# Altium footprint library MyPCBLib.PcbLib: 103 footprints (part 7 of 7)
Each footprint in its own frame and in the unit in brackets; x right, y up, seen from the top. Pads: shape width x height; smd on the part's side, far side on the other; paste and mask are expansions set on the pad; w line width, h text height; cw(c..) or ccw(c..) is an arc to the next point about the centre after c.
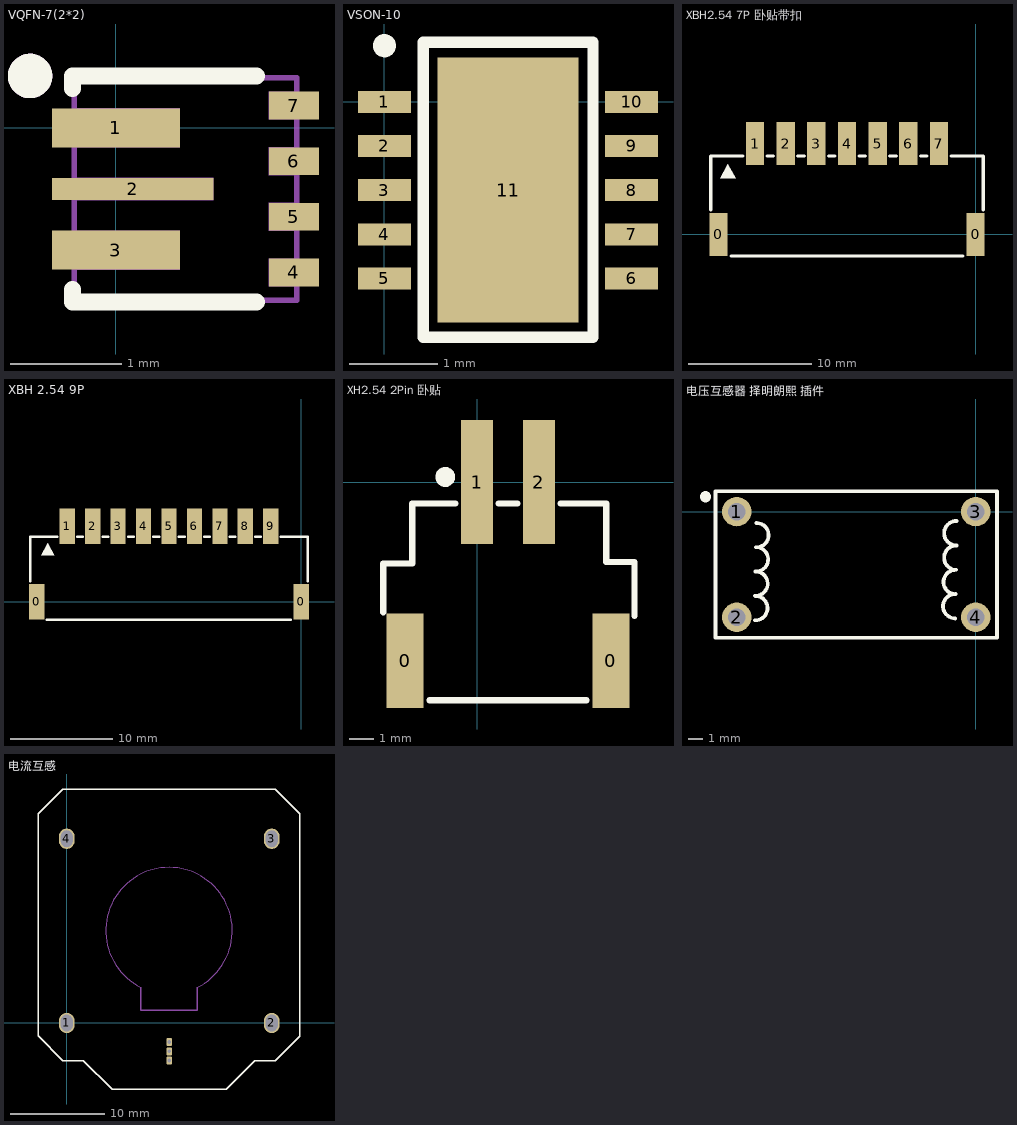
[diagram p6: the footprints below, top view; thin cyan lines are the x and y axes]

## VQFN-7(2*2) [mm]
pads (7):
  rect 1.15x0.35 smd paste+0 mask+0.05: 1(0,0) 3(0,-1.1)
  rect 1.45x0.2 smd paste+0 mask+0.05: 2(0.15,-0.55)
  rect 0.45x0.25 smd paste+0 mask+0.05: 4(1.6,-1.3) 5(1.6,-0.8) 6(1.6,-0.3) 7(1.6,0.2)
Top Overlay:
  circle w0.2: c-0.772,0.466 r0.1
  lines w0.152: -0.391,-1.455 -0.391,-1.566 1.265,-1.566 ; -0.391,0.355 -0.391,0.466 1.265,0.466
Mechanical 6:
  circle w0.2: c-0.772,0.466 r0.1
Mechanical 15:
  region: -0.315,0.45 -0.315,0.475 -0.35,0.51 -0.4,0.51 -0.435,0.475 -0.435,0.45 -0.435,0.425 -0.4,0.39 -0.35,0.39 -0.315,0.425
  region: -0.375,-0.45 0.875,-0.45 0.875,-0.65 -0.375,-0.65
  region: -0.375,-0.925 0.575,-0.925 0.575,-1.275 -0.375,-1.275
  region: -0.375,0.175 0.575,0.175 0.575,-0.175 -0.375,-0.175
  region: 1.375,-1.175 1.625,-1.175 1.625,-1.425 1.375,-1.425
  region: 1.375,-0.675 1.625,-0.675 1.625,-0.925 1.375,-0.925
  region: 1.375,-0.175 1.625,-0.175 1.625,-0.425 1.375,-0.425
  region: 1.375,0.325 1.625,0.325 1.625,0.075 1.375,0.075
  lines w0.051: -0.375,-1.55 1.625,-1.55 1.625,0.45 -0.375,0.45 -0.375,-1.55

## VSON-10 [mil] "TI Power IC"
pads (11):
  rect 23.6x9.8 smd mask+2: 1(0,0) 2(0,-19.7) 3(0,-39.4) 4(0,-59.1) 5(0,-78.8) 6(110.2,-78.8) 7(110.2,-59.1) 8(110.2,-39.4) 9(110.2,-19.7) 10(110.2,0)
  rect 63x118.1 smd mask+2: 11(55.1,-39.4)
Top Overlay:
  circle w5.9: c0,25 r2.2
  lines w5.04: 17.29,-105 93,-105 93,24.42 93,26.51 17.29,26.51 17.29,-105

## XBH2.54 7P 卧贴带扣 [mm]
pads (9):
  rect 1.5x3.5 smd paste+0 mask+0.05: 0(-20.96,0) 0(0,0) 1(-17.98,7.4) 2(-15.48,7.4) 3(-12.98,7.4) 4(-10.48,7.4) 5(-7.98,7.4) 6(-5.48,7.4) 7(-2.98,7.4)
Top Overlay:
  region: -20.193,5.715 -20.828,4.572 -19.558,4.572
  lines w0.254: -21.589,1.981 -21.589,6.384 -18.961,6.384 ; -19.938,-1.761 -1.022,-1.761 ; -16.999,6.384 -16.461,6.384 ; -14.499,6.384 -13.961,6.384 ; -11.999,6.384 -11.461,6.384 ; -9.499,6.384 -8.961,6.384 ; -6.999,6.384 -6.461,6.384 ; -4.499,6.384 -3.961,6.384 ; -1.999,6.384 0.629,6.384 0.629,1.981 ; -18.961,6.384 -19.499,6.384 -18.961,6.384

## XBH 2.54 9P [mm]
pads (11):
  rect 1.5x3.5 smd paste+0 mask+0.05: 0(-25.96,0) 0(0,0) 1(-22.98,7.4) 2(-20.48,7.4) 3(-17.98,7.4) 4(-15.48,7.4) 5(-12.98,7.4) 6(-10.48,7.4) 7(-7.98,7.4) 8(-5.48,7.4) 9(-2.98,7.4)
Top Overlay:
  region: -24.889,5.708 -25.524,4.565 -24.254,4.565
  lines w0.254: -26.589,1.981 -26.589,6.384 -23.961,6.384 -24.499,6.384 ; -24.979,-1.761 -1.022,-1.761 ; -21.999,6.384 -21.461,6.384 ; -19.499,6.384 -18.961,6.384 ; -16.999,6.384 -16.461,6.384 ; -14.499,6.384 -13.961,6.384 ; -11.999,6.384 -11.461,6.384 ; -9.499,6.384 -8.961,6.384 ; -6.999,6.384 -6.461,6.384 ; -4.499,6.384 -3.961,6.384 ; -1.999,6.384 0.629,6.384 0.629,1.981

## XH2.54 2Pin 卧贴 [mm]
pads (4):
  rect 1.5x3.8 smd paste+0 mask+0.05: 0(-2.9,-7.2) 0(5.4,-7.2)
  rect 1.3x5 smd paste+0 mask+0.05: 1(0,0) 2(2.5,0)
Top Overlay:
  circle w0.4: c-1.28,0.21 r0.2
  lines w0.254: -3.78,-5.25 -3.78,-3.28 -2.61,-3.28 -2.61,-0.86 -0.881,-0.86 ; -1.919,-8.8 4.419,-8.8 ; 0.881,-0.86 1.619,-0.86 ; 3.381,-0.86 5.21,-0.86 5.21,-3.22 6.35,-3.22 6.35,-5.4

## 电压互感器 择明朗熙 插件 [mm]
pads (4):
  round 2 hole 1.2: 1(-16.3,0) 2(-16.3,-7.2) 3(0,0) 4(0,-7.2)
Top Overlay:
  lines w0.254: -15.061,-7.411 ccw(c-15.031,-6.581) -15.031,-5.75 ; -15.051,-5.741 ccw(c-15.02,-4.911) -15.021,-4.08 ; -15.011,-4.081 ccw(c-14.987,-3.251) -14.981,-2.42 ; -14.979,-2.431 ccw(c-14.956,-1.601) -14.949,-0.77 ; -1.401,-7.28 cw(c-1.399,-6.449) -1.371,-5.619 ; -1.37,-5.63 cw(c-1.369,-4.799) -1.34,-3.969 ; -1.33,-3.97 cw(c-1.328,-3.139) -1.3,-2.309 ; -1.32,-2.3 cw(c-1.327,-1.469) -1.29,-0.639 ; -17.75,-8.6 -17.75,1.4 1.45,1.4 1.45,-8.6 -17.75,-8.6
  lines w0.75: -18.443,1.016 ccw(c-18.726,1.039) -18.442,1.039
Mechanical 15:
  region: -15.9,-7.2 -15.9,-7.12 -15.961,-6.973 -16.074,-6.861 -16.221,-6.8 -16.38,-6.8 -16.527,-6.861 -16.639,-6.973 -16.7,-7.12 -16.7,-7.2 -16.7,-7.28 -16.639,-7.427 -16.527,-7.539 -16.38,-7.6 -16.221,-7.6 -16.074,-7.539 -15.961,-7.427 -15.9,-7.28
  region: 0.4,-7.2 0.4,-7.12 0.339,-6.973 0.226,-6.861 0.079,-6.8 -0.08,-6.8 -0.227,-6.861 -0.339,-6.973 -0.4,-7.12 -0.4,-7.2 -0.4,-7.28 -0.339,-7.427 -0.227,-7.539 -0.08,-7.6 0.079,-7.6 0.226,-7.539 0.339,-7.427 0.4,-7.28
  region: -15.9,0 -15.9,0.08 -15.961,0.227 -16.074,0.339 -16.221,0.4 -16.38,0.4 -16.527,0.339 -16.639,0.227 -16.7,0.08 -16.7,0 -16.7,-0.08 -16.639,-0.227 -16.527,-0.339 -16.38,-0.4 -16.221,-0.4 -16.074,-0.339 -15.961,-0.227 -15.9,-0.08
  region: 0.4,0 0.4,0.08 0.339,0.227 0.226,0.339 0.079,0.4 -0.08,0.4 -0.227,0.339 -0.339,0.227 -0.4,0.08 -0.4,0 -0.4,-0.08 -0.339,-0.227 -0.227,-0.339 -0.08,-0.4 0.079,-0.4 0.226,-0.339 0.339,-0.227 0.4,-0.08
  region: -17.59,1.4 -17.59,1.425 -17.625,1.46 -17.675,1.46 -17.71,1.425 -17.71,1.4 -17.71,1.375 -17.675,1.34 -17.625,1.34 -17.59,1.375
  lines w0.051: -17.65,-8.6 1.35,-8.6 1.35,1.4 -17.65,1.4 -17.65,-8.6

## 电流互感 [mm]
pads (7):
  oval 1.65x2.15 hole 1.25 slot 1.75 at 90 deg: 1(0,0) 2(21.7,0) 3(21.7,19.5) 4(0,19.5)
  rrect50% 0.6x0.85 hole 0.4 square: 4(10.85,-3.975) 4(10.85,-3) 4(10.85,-2.025)
Top Overlay:
  lines w0.152: 22.06,-3.999 24.673,-1.386 ; 22.06,24.764 24.674,22.151 ; 24.673,-1.407 24.673,-1.386 ; -3.027,-1.368 -0.414,-3.98 ; -3.027,-1.368 -0.413,-3.981 ; -3.027,-1.368 -3.027,22.151 ; -3.026,22.151 -0.414,24.764 ; -3.026,22.151 -0.413,24.764 ; -0.413,-3.981 1.753,-3.981 4.748,-6.985 16.898,-6.986 19.893,-3.981 22.078,-3.981 24.673,-1.386 ; -0.413,24.764 22.06,24.764 24.673,22.151 ; 24.673,-1.386 24.673,-1.385 24.673,22.151 ; 24.673,-1.386 24.673,-1.386
Mechanical 1:
  lines w0.128: 7.809,3.781 cw(c10.823,9.764) 13.825,3.774
  lines w0.152: 7.81,3.768 7.823,1.364 13.823,1.364 13.835,3.773